# Altium footprint library ATK-DNN647_V1.0.PcbLib: 73 footprints (part 1 of 5)
Each footprint in its own frame and in the unit in brackets; x right, y up, seen from the top. Pads: shape width x height; smd on the part's side, far side on the other; paste and mask are expansions set on the pad; w line width, h text height; cw(c..) or ccw(c..) is an arc to the next point about the centre after c.
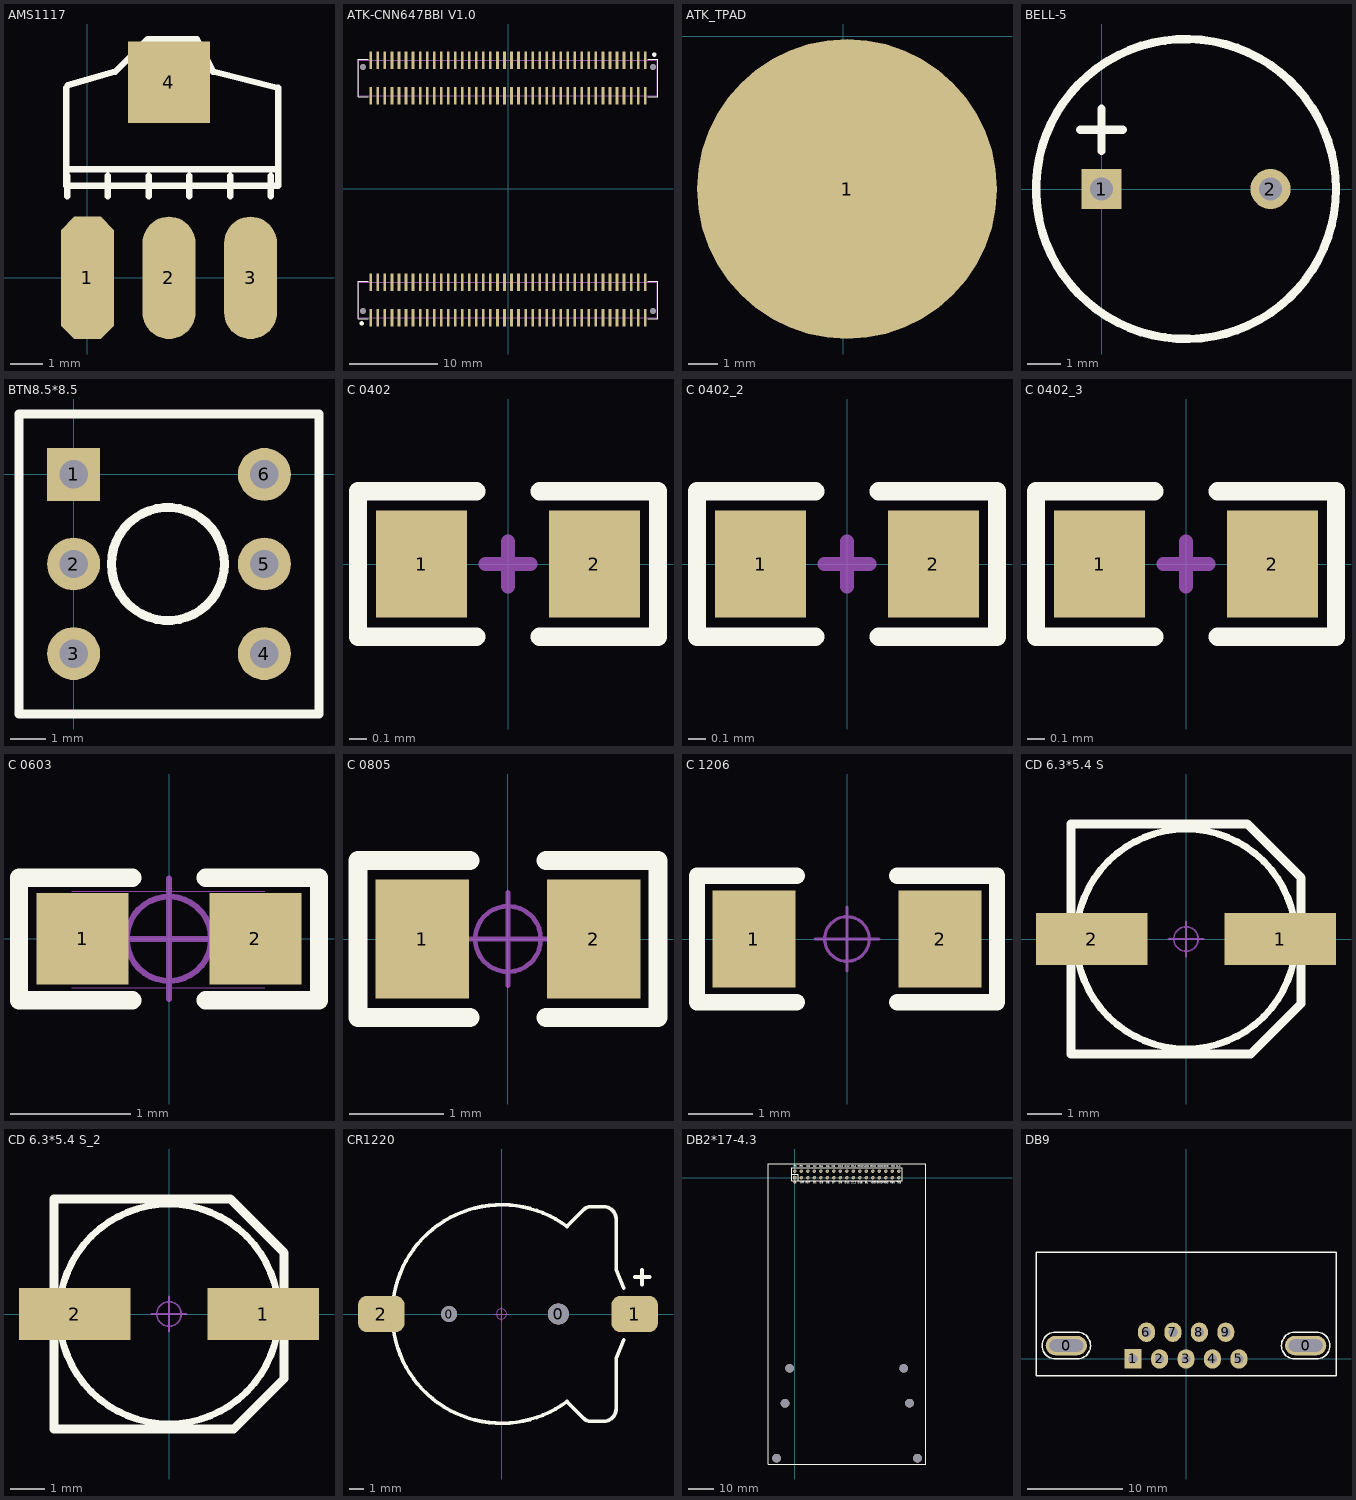
[diagram p0: the footprints below, top view; thin cyan lines are the x and y axes]

## AMS1117 [mil]
pads (4):
  oct 65x150 smd: 1(0.03,-0.06)
  oval 65x150 smd: 2(100.03,-0.06) 3(200.03,-0.06)
  rect 100x100 smd: 4(100.03,239.94)
Top Overlay:
  lines w7.87: -25.97,232.94 -25.97,132.94 ; -24.97,99.94 -24.97,124.94 ; -24.3,236.27 34.03,252.94 74.03,292.94 134.03,292.94 154.03,252.94 234.03,232.94 234.03,112.94 ; 25.03,99.94 25.03,124.94 ; 75.03,99.94 75.03,124.94 ; 125.03,99.94 125.03,124.94 ; 175.03,99.94 175.03,124.94 ; 225.03,99.94 225.03,124.94 ; -25.97,132.94 -25.97,112.94 234.03,112.94 ; -25.97,132.94 234.03,132.94 234.03,112.94

## ATK-CNN647BBI V1.0 [mm]
pads (164):
  rect 0.3x2 smd: 1(-15.6,-14.622) 2(-14.8,-14.622) 3(-14,-14.622) 4(-13.2,-14.622) 5(-12.4,-14.622) 6(-11.6,-14.622) 7(-10.8,-14.622) 8(-10,-14.622) 9(-9.2,-14.622) 10(-8.4,-14.622) 11(-7.6,-14.622) 12(-6.8,-14.622) 13(-6,-14.622) 14(-5.2,-14.622) 15(-4.4,-14.622) 16(-3.6,-14.622) 17(-2.8,-14.622) 18(-2,-14.622) 19(-1.2,-14.622) 20(-0.4,-14.622) 21(0.4,-14.622) 22(1.2,-14.622) 23(2,-14.622) 24(2.8,-14.622) 25(3.6,-14.622) 26(4.4,-14.622) 27(5.2,-14.622) 28(6,-14.622) 29(6.8,-14.622) 30(7.6,-14.622) 31(8.4,-14.622) 32(9.2,-14.622) 33(10,-14.622) 34(10.8,-14.622) 35(11.6,-14.622) 36(12.4,-14.622) 37(13.2,-14.622) 38(14,-14.622) 39(14.8,-14.622) 40(15.6,-14.622) 41(15.6,-10.622) 42(14.8,-10.622) 43(14,-10.622) 44(13.2,-10.622) 45(12.4,-10.622) 46(11.6,-10.622) 47(10.8,-10.622) 48(10,-10.622) 49(9.2,-10.622) 50(8.4,-10.622) 51(7.6,-10.622) 52(6.8,-10.622) 53(6,-10.622) 54(5.2,-10.622) 55(4.4,-10.622) 56(3.6,-10.622) 57(2.8,-10.622) 58(2,-10.622) 59(1.2,-10.622) 60(0.4,-10.622) 61(-0.4,-10.622) 62(-1.2,-10.622) 63(-2,-10.622) 64(-2.8,-10.622) 65(-3.6,-10.622) 66(-4.4,-10.622) 67(-5.2,-10.622) 68(-6,-10.622) 69(-6.8,-10.622) 70(-7.6,-10.622) 71(-8.4,-10.622) 72(-9.2,-10.622) 73(-10,-10.622) 74(-10.8,-10.622) 75(-11.6,-10.622) 76(-12.4,-10.622) 77(-13.2,-10.622) 78(-14,-10.622) 79(-14.8,-10.622) 80(-15.6,-10.622) 81(15.6,14.622) 82(14.8,14.622) 83(14,14.622) 84(13.2,14.622) 85(12.4,14.622) 86(11.6,14.622) 87(10.8,14.622) 88(10,14.622) 89(9.2,14.622) 90(8.4,14.622) 91(7.6,14.622) 92(6.8,14.622) 93(6,14.622) 94(5.2,14.622) 95(4.4,14.622) 96(3.6,14.622) 97(2.8,14.622) 98(2,14.622) 99(1.2,14.622) 100(0.4,14.622) 101(-0.4,14.622) 102(-1.2,14.622) 103(-2,14.622) 104(-2.8,14.622) 105(-3.6,14.622) 106(-4.4,14.622) 107(-5.2,14.622) 108(-6,14.622) 109(-6.8,14.622) 110(-7.6,14.622) 111(-8.4,14.622) 112(-9.2,14.622) 113(-10,14.622) 114(-10.8,14.622) 115(-11.6,14.622) 116(-12.4,14.622) 117(-13.2,14.622) 118(-14,14.622) 119(-14.8,14.622) 120(-15.6,14.622) 121(-15.6,10.622) 122(-14.8,10.622) 123(-14,10.622) 124(-13.2,10.622) 125(-12.4,10.622) 126(-11.6,10.622) 127(-10.8,10.622) 128(-10,10.622) 129(-9.2,10.622) 130(-8.4,10.622) 131(-7.6,10.622) 132(-6.8,10.622) 133(-6,10.622) 134(-5.2,10.622) 135(-4.4,10.622) 136(-3.6,10.622) 137(-2.8,10.622) 138(-2,10.622) 139(-1.2,10.622) 140(-0.4,10.622) 141(0.4,10.622) 142(1.2,10.622) 143(2,10.622) 144(2.8,10.622) 145(3.6,10.622) 146(4.4,10.622) 147(5.2,10.622) 148(6,10.622) 149(6.8,10.622) 150(7.6,10.622) 151(8.4,10.622) 152(9.2,10.622) 153(10,10.622) 154(10.8,10.622) 155(11.6,10.622) 156(12.4,10.622) 157(13.2,10.622) 158(14,10.622) 159(14.8,10.622) 160(15.6,10.622)
  round 0.65 hole 0.65 unplated: ""(-16.5,-13.872) ""(-16.5,13.872) ""(16.5,-13.872) ""(16.5,13.872)
Top Overlay:
  circle w0.25: c-16.637,-15.289 r0.125
  circle w0.25: c16.637,15.289 r0.125
  lines w0.12: -15.912,-14.732 -17.06,-14.732 -17.06,-10.512 -15.912,-10.512 ; -15.912,10.512 -17.06,10.512 -17.06,14.732 -15.912,14.732 ; 15.912,-14.732 17.06,-14.732 17.06,-10.512 15.912,-10.512 ; 15.912,10.512 17.06,10.512 17.06,14.732 15.912,14.732
Mechanical 13:
  lines w0.1: -16.95,-14.622 -16.95,-10.622 16.95,-10.622 16.95,-14.622 -16.95,-14.622 ; -16.95,10.622 16.95,10.622 16.95,14.622 -16.95,14.622 -16.95,10.622
3D body "SGDBF-08-080P-H10.step": height 3, standoff -0.6, extent -16.95,-15.222 16.95,-10.022
3D body "SGDBF-08-080P-H10.step": height 3, standoff -0.6, extent -16.95,10.022 16.95,15.222
3D body "CNN647BBI V1.0.step": height 14.14, standoff 1.04, extent -22.5,-16 22.5,16

## ATK_TPAD [mil]
pads (1):
  round 402 smd paste-450 mask+4: 1(5,-205)
Top Overlay:
  drawing of 776 lines, arcs and shapes, not listed

## BELL-5 [mm] "PIN:5MM,SIZE:10MM"
height 3
pads (2):
  rect 1.2x1.2 hole 0.7: 1(0,0)
  round 1.2 hole 0.7: 2(5.08,0)
Top Overlay:
  circle w0.254: c2.54,0 r4.51
  lines w0.254: -0.635,1.778 0.635,1.778 ; 0,1.143 0,2.413

## BTN8.5*8.5 [mm]
height 15
pads (6):
  rect 1.5x1.5 hole 0.8: 1(0,0)
  round 1.5 hole 0.8: 2(0,-2.54) 3(0,-5.08) 4(5.4,-5.08) 5(5.4,-2.54) 6(5.4,0)
Top Overlay:
  circle w0.254: c2.667,-2.54 r1.6
  lines w0.254: -1.55,-6.79 6.95,-6.79 6.95,1.71 -1.55,1.71 -1.55,-6.79

## C 0402 [mil] "无极性贴片电容(0402)"
height 29.53
pads (2):
  rect 20x23.62 smd mask+2: 1(-19,0) 2(19,0)
Top Overlay:
  lines w4: -7,-16 -33,-16 -33,16 -7,16 ; 7,-16 33,-16 33,16 7,16
Mechanical 15:
  lines w3: -5,0 5,0 ; 0,-5 0,5
3D body "C 0402.STEP": height 20.08, standoff -0.39, extent -19.69,-10.24 19.69,10.24

## C 0402_2 [mil]
pads (2):
  rect 20x23.62 smd mask+2: 1(-19,0) 2(19,0)
Top Overlay:
  lines w4: -7,-16 -33,-16 -33,16 -7,16 ; 7,-16 33,-16 33,16 7,16
Mechanical 15:
  lines w3: -5,0 5,0 ; 0,-5 0,5
3D body "C 0402.STEP": height 20.08, standoff -0.39, extent -19.69,-10.24 19.69,10.24

## C 0402_3 [mil]
pads (2):
  rect 20x23.62 smd mask+2: 1(-19,0) 2(19,0)
Top Overlay:
  lines w4: -7,-16 -33,-16 -33,16 -7,16 ; 7,-16 33,-16 33,16 7,16
Mechanical 15:
  lines w3: -5,0 5,0 ; 0,-5 0,5
3D body "C 0402.STEP": height 20.08, standoff -0.39, extent -19.69,-10.24 19.69,10.24

## C 0603 [mil] "无极性贴片电容(0603)"
pads (2):
  rect 30x30 smd mask+2: 1(-28.25,0) 2(28.25,0)
Top Overlay:
  lines w6: -12,-20.06 -49,-20.06 -49,19.94 -12,19.94 ; 12,-20.06 49,-20.06 49,19.94 12,19.94
Mechanical 13:
  lines w0.39: -31.75,-16 31.25,-16 ; -31.75,15.5 31.25,15.5
Mechanical 15:
  circle w1.97: c0,0 r13.78
  lines w1.97: -19.69,0 19.68,0 ; 0,-19.68 0,19.68
3D body "C 0603.STEP": height 31.89, standoff -0.39, extent -31.5,-16.14 31.5,16.14

## C 0805 [mm] "无极性贴片电容(0805)"
height 0.5
pads (2):
  rect 1x1.27 smd: 1(-0.914,0) 2(0.914,0)
Top Overlay:
  lines w0.203: -0.406,-0.838 -1.6,-0.838 -1.6,0.838 -0.406,0.838 ; 0.406,-0.838 1.6,-0.838 1.6,0.838 0.406,0.838
Mechanical 15:
  circle w0.05: c0,0 r0.35
  lines w0.05: -0.5,0 0.5,0 ; 0,-0.5 0,0.5
3D body "C 0805.STEP": height 0.51, standoff -0.01, extent -1,-0.61 1,0.61

## C 1206 [mil] "无极性贴片电容(1206)"
pads (2):
  rect 51.18x60 smd: 1(-57.5,0) 2(57.5,0)
Top Overlay:
  lines w10: -31,-39 -92.52,-39 -92.52,39 -31,39 ; 31,-39 92.52,-39 92.52,39 31,39
Mechanical 15:
  circle w1.97: c0,0 r13.78
  lines w1.97: -19.68,0 19.68,0 ; 0,-19.68 0,19.68
3D body "C 1206.STEP": height 47.64, standoff -0.39, extent -62.99,-31.89 62.99,31.89

## CD 6.3*5.4 S [mm] "有极性贴片电容(直径6.3mm高5.4mm)"
height 5.4
pads (2):
  rect 3.2x1.5 smd: 1(2.7,0) 2(-2.7,0)
Top Overlay:
  circle w0.2: c0,0 r3.15
  lines w0.254: -3.3,-3.3 1.85,-3.3 3.3,-1.85 3.3,1.75 1.75,3.3 -3.3,3.3 -3.3,-3.3
Mechanical 15:
  circle w0.05: c0,0 r0.35
  lines w0.05: -0.5,0 0.5,0 ; 0,-0.5 0,0.5
3D body "ALU-D6.3x5.3.STEP": height 5.4, standoff 0, extent -3.525,-3.3 3.475,3.3

## CD 6.3*5.4 S_2 [mm]
pads (2):
  rect 3.2x1.5 smd: 1(2.7,0) 2(-2.7,0)
Top Overlay:
  circle w0.2: c0,0 r3.15
  lines w0.254: -3.3,-3.3 -3.3,3.3 1.75,3.3 3.3,1.75 3.3,-1.85 1.85,-3.3 -3.3,-3.3
Mechanical 15:
  circle w0.05: c0,0 r0.35
  lines w0.05: -0.5,0 0.5,0 ; 0,-0.5 0,0.5
3D body "ALU-D6.3x5.3.STEP": height 5.4, standoff 0, extent -3.525,-3.3 3.475,3.3

## CR1220 [mm] "纽扣电池座"
pads (4):
  round 1.1 hole 1.1: 0(-3.6,0)
  round 1.45 hole 1.45: 0(3.9,0)
  rrect50% 3.2x2.5 smd: 1(9.144,0) 2(-8.255,0)
Top Overlay:
  lines w0.254: 4.5,-6 cw(c0,0) 4.5,6 ; 4.572,-6.096 4.826,-6.35 5.662,-7.186 ccw(c6.096,-6.753) 6.096,-7.366 7.007,-7.366 ccw(c7.007,-6.499) 7.874,-6.499 7.874,-3.048 8.382,-1.778 ; 4.572,6.096 4.826,6.35 5.662,7.186 cw(c6.096,6.753) 6.096,7.366 7.007,7.366 cw(c7.007,6.499) 7.874,6.499 7.874,3.048 8.382,1.778 ; 9.144,2.54 10.16,2.54 ; 9.652,2.032 9.652,3.048
Mechanical 15:
  circle w0.05: c0,0 r0.35
  lines w0.05: -0.5,0 0.5,0 ; 0,-0.5 0,0.5
3D body "CR1220_A.STEP": height 4.05, standoff -0.85, extent -9.416,-7.45 10.34,7.45

## DB2*17-4.3 [mm] "DB_LCD-4.3'"
height 15
pads (40):
  rect 1.3x1.3 hole 0.8: 1(-0.002,0.006)
  round 1.3 hole 0.8: 2(-0.002,2.546) 3(2.538,0.006) 4(2.538,2.546) 5(5.08,0) 6(5.078,2.546) 7(7.62,0) 8(7.62,2.54) 9(10.158,0.006) 10(10.158,2.546) 11(12.698,0.006) 12(12.698,2.546) 13(15.238,0.006) 14(15.238,2.546) 15(17.778,0.006) 16(17.778,2.546) 17(20.318,0.006) 18(20.318,2.546) 19(22.858,0.006) 20(22.858,2.546) 21(25.398,0.006) 22(25.398,2.546) 23(27.938,0.006) 24(27.938,2.546) 25(30.478,0.006) 26(30.478,2.546) 27(33.018,0.006) 28(33.018,2.546) 29(35.558,0.006) 30(35.558,2.546) 31(38.098,0.006) 32(38.098,2.546) 33(40.638,0.006) 34(40.638,2.546)
  round 3.4 hole 3.4: ""(-7.125,-109.596) ""(-3.81,-88.18) ""(-2.037,-74.525) ""(42.54,-74.525) ""(44.82,-88.12) ""(47.925,-109.596)
Top Overlay:
  lines w0.203: -1.27,1.27 1.27,1.27 1.27,-1.23 1.32,-1.28 -1.26,-1.28 -1.27,-1.27 -1.27,3.82 41.91,3.82 41.91,-1.26 ; 1.21,-1.28 41.91,-1.28 ; 41.91,-1.25 41.91,-0.95
  lines w0.254: -10.38,-111.887 -10.38,5.334 51.17,5.334 51.17,-111.887 -10.38,-111.887
  text "D14" at 22.023,4.106 h0.76
  text "D7" at 14.603,-2.28 h0.76
  text "RS" at -0.477,4.106 h0.76
  text "CS" at -0.51,-2.28 h0.76
  text "WR" at 2.03,-2.28 h0.76
  text "RST" at 4.189,-2.28 h0.76
  text "D1" at 7.237,-2.28 h0.76
  text "D2" at 7.148,4.106 h0.76
  text "D3" at 9.65,-2.28 h0.76
  text "D4" at 9.648,4.106 h0.76
  text "D5" at 12.19,-2.28 h0.76
  text "D6" at 12.273,4.106 h0.76
  text "D8" at 14.398,4.106 h0.76
  text "D9" at 17.143,-2.28 h0.76
  text "D12" at 19.523,4.106 h0.76
  text "RD" at 2.025,4.1 h0.76
  text "D0" at 4.65,4.1 h0.76
  text "D10" at 16.9,4.1 h0.76
  text "VDD" at 27.025,4.1 h0.76
  text "D15" at 24.636,-2.28 h0.76
  text "VDD" at 29.589,-2.28 h0.76
  text "GND" at 29.525,4.1 h0.76
  text "VDD" at 32.15,4.1 h0.76
  text "VDD" at 29.591,-2.286 h0.76
  text "D15" at 24.638,-2.286 h0.76
  text "D12" at 19.525,4.1 h0.76
  text "D13" at 22.025,-2.296 h0.76
  text "D9" at 17.145,-2.286 h0.76
  text "D8" at 14.4,4.1 h0.76
  text "D6" at 12.275,4.1 h0.76
  text "D5" at 12.192,-2.286 h0.76
  text "D4" at 9.65,4.1 h0.76
  text "D3" at 9.652,-2.286 h0.76
  text "D2" at 7.15,4.1 h0.76
  text "D1" at 7.239,-2.286 h0.76
  text "RST" at 4.191,-2.286 h0.76
  text "WR" at 2.032,-2.286 h0.76
  text "CS" at -0.508,-2.286 h0.76
  text "RS" at -0.475,4.1 h0.76
  text "D7" at 14.605,-2.286 h0.76
  text "D14" at 22.025,4.1 h0.76
  text "BL" at 27.557,-2.28 h0.76
  text "MISO" at 34.288,-2.28 h0.76
  text "TCS" at 39.749,-2.28 h0.76
  text "MO" at 37.648,4.106 h0.76
  text "MOSI" at 34.398,4.106 h0.76
  text "CLK" at 39.648,4.106 h0.76
  text "PEN" at 37.209,-2.28 h0.76
  text "D11" at 19.556,-2.28 h0.76
  text "GND" at 32.002,-2.28 h0.76
  text "GND" at 24.523,4.106 h0.76
  text "RD" at 2.023,4.106 h0.76
  text "D0" at 4.648,4.106 h0.76
  text "D10" at 16.898,4.106 h0.76
  text "VDD" at 27.023,4.106 h0.76
  text "GND" at 29.523,4.106 h0.76
  text "VDD" at 32.148,4.106 h0.76
  text "MISO" at 34.29,-2.286 h0.76
  text "TCS" at 39.751,-2.286 h0.76
  text "MO" at 37.65,4.1 h0.76
  text "MOSI" at 34.4,4.1 h0.76
  text "CLK" at 39.65,4.1 h0.76
  text "PEN" at 37.211,-2.286 h0.76
  text "D11" at 19.558,-2.286 h0.76
  text "GND" at 32.004,-2.286 h0.76
  text "GND" at 24.525,4.1 h0.76
  text "BL" at 27.559,-2.286 h0.76

## DB9 [mil]
height 590.55
pads (11):
  oval 170x80 hole 50 slot 140 at 0 deg: 0(-493,55) 0(493,55)
  rect 70x80 hole 38: 1(-218,0)
  oval 70x80 hole 38: 2(-109,0) 3(0,0) 4(109,0) 5(218,0) 6(-163,110) 7(-54,110) 8(55,110) 9(164,110)
Top Overlay:
  lines w6: -618,-70 -618,440 618,440 618,-70 -618,-70 ; -538,0 cw(c-538,55) -538,110 -448,110 cw(c-448,55) -448,0 -538,0 ; 448,0 cw(c448,55) 448,110 538,110 cw(c538,55) 538,0 448,0